# Altium footprint library Switch-4.PcbLib: 1 footprints
Each footprint in its own frame and in the unit in brackets; x right, y up, seen from the top. Pads: shape width x height; smd on the part's side, far side on the other; paste and mask are expansions set on the pad; w line width, h text height; cw(c..) or ccw(c..) is an arc to the next point about the centre after c.
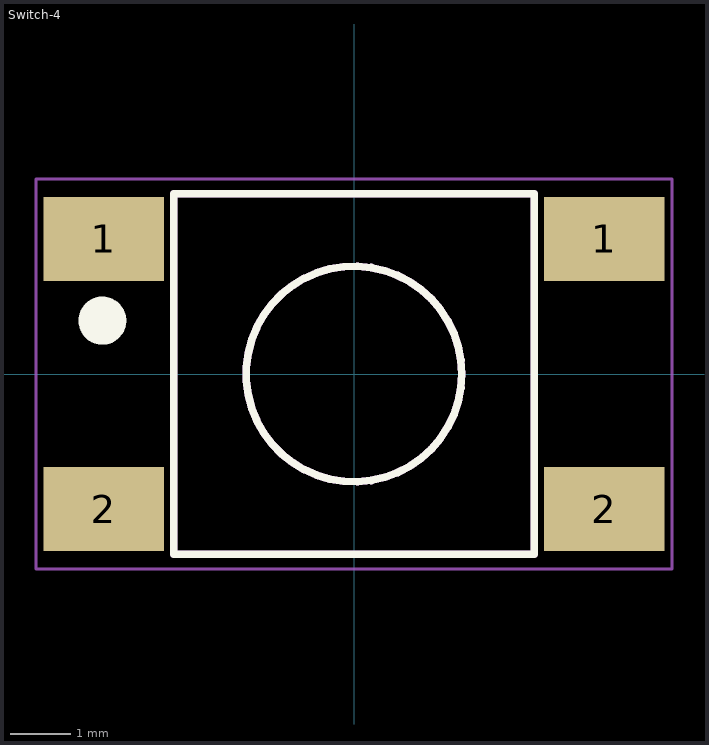
[diagram p0: the footprint, top view; thin cyan lines are the x and y axes]

## Switch-4 [mm]
pads (4):
  rect 2x1.4 smd: 1(-4.169,2.25) 1(4.169,2.25) 2(-4.169,-2.25) 2(4.169,-2.25)
Top Overlay:
  circle w0.4: c-4.191,0.889 r0.2
  circle w0.127: c0,0 r1.796
  lines w0.127: -3,-3 3,-3 3,3 -3,3 -3,-3
Mechanical 1:
  circle w0.127: c0,0 r1.796
  lines w0.05: -5.3,-3.25 -5.3,3.25 5.3,3.25 5.3,-3.25 -5.3,-3.25
  lines w0.127: -3,-3 3,-3 3,3 -3,3 -3,-3
3D body "Switch-4.stp": height 4.3, standoff 0, extent -4.508,-3.016 4.508,3.016